# EAGLE library part LM393 (library EMSinterface_V1.0)
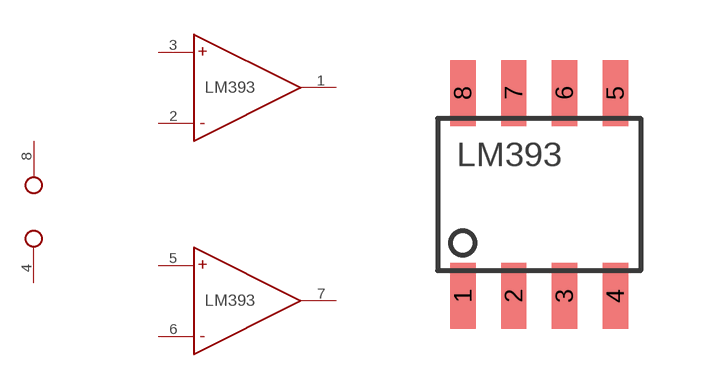
[diagram p1: symbol with the pads of LM393; footprint LM393]

Designator prefix -; gates G$1=PSUPLY G$2=LM393 G$3=LM393

## LM393  [LM393]
1  G$2:OUT  out
2  G$2:IN-  in
3  G$2:IN+  in
4  G$1:GND  pwr
5  G$3:IN+  in
6  G$3:IN-  in
7  G$3:OUT  out
8  G$1:VCC  pwr

## Footprint LM393 (pad centres in mm)
smd 0.635 x 1.651: 1 -1.905,-2.54; 2 -0.635,-2.54; 3 0.635,-2.54; 4 1.905,-2.54; 5 1.905,2.54; 6 0.635,2.54; 7 -0.635,2.54; 8 -1.905,2.54